# Altium schematic symbol library LR112x_e655v01a.SchLib: 35 symbols
Pins are listed as number, name and electrical type; pins without a type are passive.

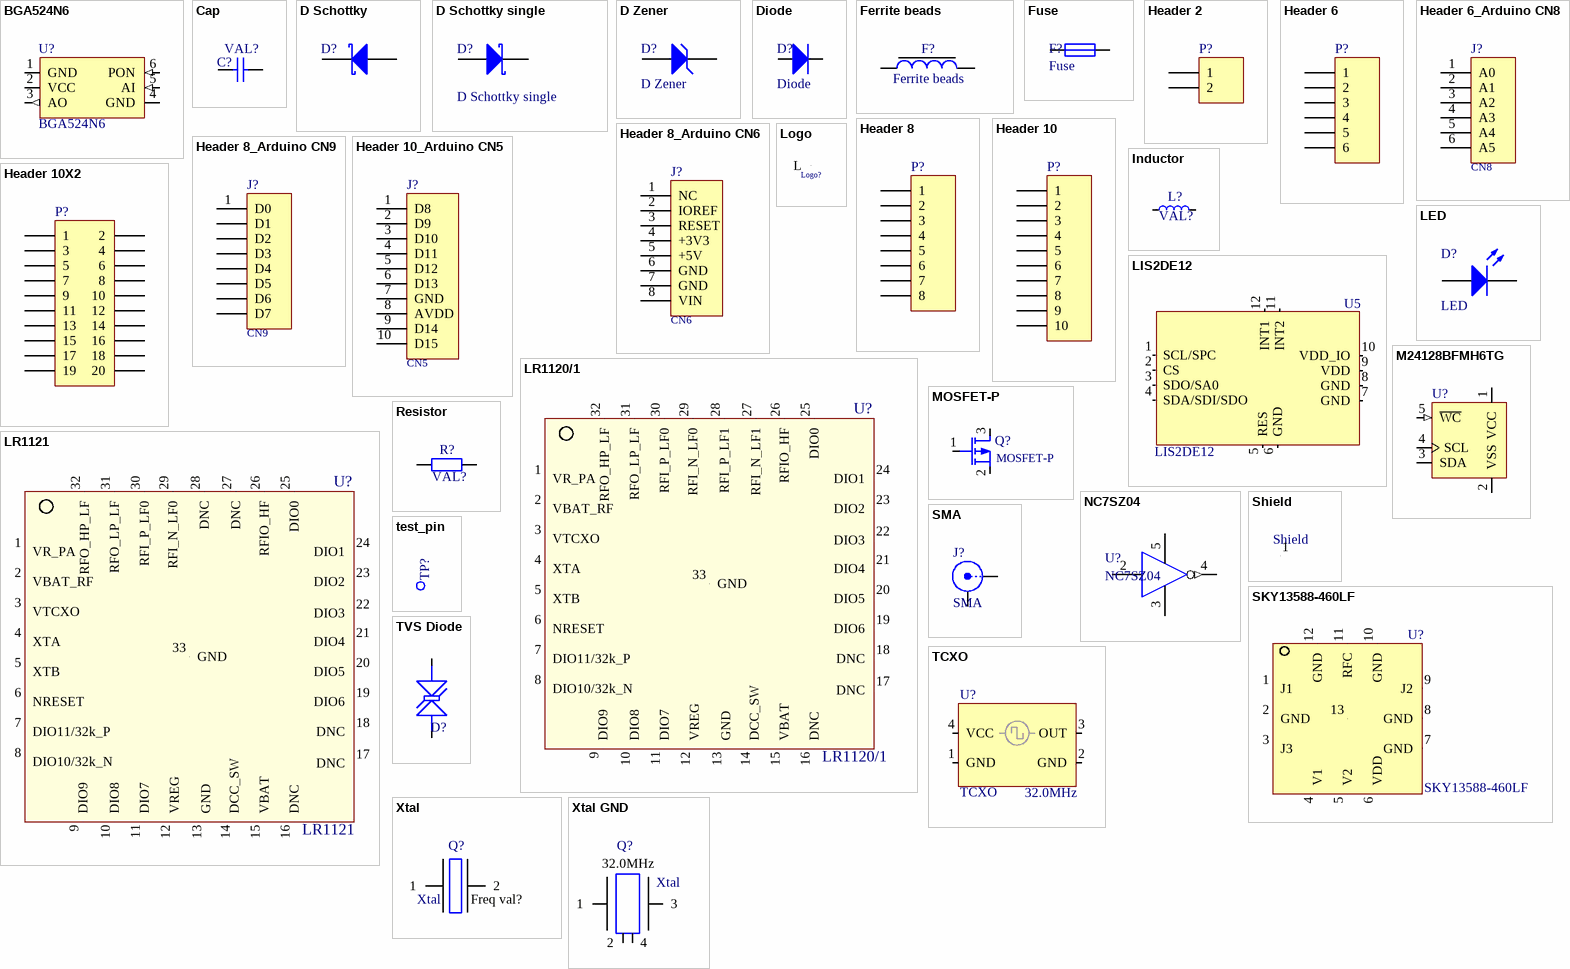
[diagram p0: symbols BGA524N6 to Xtal GND]

## BGA524N6
designator U?
Silicon Germanium Low Noise Amplifier
footprint TSNP-6-2 (TSNP-6-2 6-Leads, Body 1.1x0.7mm)
pins: 1 GND   (power), 2 VCC (power), 3 AO (out), 4 GND (power), 5 AI (in), 6 PON (in)

## Cap
designator C?  value VAL?  (hidden comment: Cap)
Capacitor SMD; Published: 8-Jun-2000; LatestRevisionDate: 05-oct-2007  -  Semtech; LatestRevisionNote: Re-released for DXP Platform.; Publisher: Altium Limited
simulation model CAP (Semiconductor Capacitor)
signal-integrity model Cap Semi
footprint c_201_smd (Chip SMD component 201; Body 0.6 x 0.3 mm (LxW typ); small footprint)
footprint c_402_smd (Chip SMD component 402; Body 1.0 x 0.5 mm (LxW typ);small footprint)
footprint c_603_smd (Chip SMD component 603; Body 1.6 x 0.8mm (LxW typ); small footprint)
footprint c_805_smd (Chip SMD component 805; Body 2.0 x 1.25 mm (LxW typ); small footprint)
pins: 1, 2

## D Schottky
designator D?
Schottky Diode; Published: 8-Jun-2000; LatestRevisionDate: 17-Jul-2002; LatestRevisionNote: Re-released for DXP Platform.; PackageReference: SMB; Publisher: Altium Limited; Code_JEDEC: DO-214-AA
footprint SOD523 (SOD523; Chip Diode; Body 1.2 x 0.8 mm (LxW typ))
pins: 1 K, 2 A

## D Schottky single
designator D?
Schottky Diode
footprint SOD123 (SOD123; Chip Diode; Body  2.7 x 1.6 mm (LxW typ))
pins: 1 A, 2 K

## D Zener
designator D?
Zener Diode; Published: 8-Jun-2000; LatestRevisionDate: 05-oct-2007  -  Semtech; LatestRevisionNote: Re-released for DXP Platform.; Publisher: Altium Limited
footprint CD1608-0603 (Chip Diode; Body 1.6 x 0.8 mm (LxW typ))
footprint CD2012-0805 (Chip Diode; Body 2.0 x 1.3 mm (LxW typ))
pins: 1 A, 2 K

## Diode
designator D?
Protection Diode; Published: 8-Jun-2000; LatestRevisionDate: 17-Jul-2002; LatestRevisionNote: Re-released for DXP Platform.; PackageDocument: Sep-1996; PackageReference: SMC; Publisher: Altium Limited; Code_JEDEC: 05-oct-2007  -  Semtech
footprint CD1005-0402 (Chip Diode; Body 1.0 x 0.5 mm (LxW typ))
footprint CD1608-0603 (Chip Diode; Body 1.6 x 0.8 mm (LxW typ))
footprint CD2012-0805 (Chip Diode; Body 2.0 x 1.3 mm (LxW typ))
footprint CD3216-1206 (Chip Diode; Body 3.2 x 1.6 mm (LxW typ))
footprint PowerDI 123 (Chip Diode; PowerDI 123)
footprint DO214-AA (Chip Diode; Body 4.3 x3.6mm (LxW typ))
footprint SOD123 (SOD123; Chip Diode; Body  2.7 x 1.6 mm (LxW typ))
pins: 1 A, 2 K

## Ferrite beads
designator F?
Value: VAL?
footprint rlc_402_smd_small (Chip SMD component 402; Body 1.0 x 0.5 mm (LxW typ);small footprint)
footprint rlc_603_smd_small (Chip SMD component 603; Body 1.6 x 0.8mm (LxW typ); small footprint)
footprint rlc_805_smd_small (Chip SMD component 805; Body 2.0 x 1.25 mm (LxW typ); small footprint)
footprint rlc_1206_smd_small (Chip SMD component 1206; Body 3.2 x 1.6 mm (LxW typ))
footprint rlc_201_smd_small (Chip SMD component 201; Body 0.6 x 0.3 mm (LxW typ); small footprint)
footprint Ferrite_201_smd (Chip SMD component 201; Body 0.6 x 0.3 mm (LxW typ); small footprint)
footprint Ferrite_402_smd (Chip SMD component 402; Body 1.0 x 0.5 mm (LxW typ);small footprint)
footprint Ferrite_603_smd (Chip SMD component 603; Body 1.6 x 0.8mm (LxW typ); small footprint)
footprint Ferrite_805_smd (Chip SMD component 805; Body 2.0 x 1.25 mm (LxW typ); small footprint)
pins: 1, 2

## Fuse
designator F?
Published: 8-Jun-2000; LatestRevisionDate: 05-oct-2007  -  Semtech; LatestRevisionNote: Re-released for DXP Platform.; Publisher: Altium Limited
simulation model FUSE (Spice Subcircuit)
footprint rlc_1206_smd (Chip SMD component 1206; Body 3.2 x 1.6 mm (LxW typ))
footprint rlc_805_smd (Chip SMD component 805; Body 2.0 x 1.25 mm (LxW typ))
footprint rlc_603_smd (Chip SMD component 603; Body 1.6 x 0.8mm (LxW typ))
footprint rlc_402_smd (Chip SMD component 402; Body 1.0 x 0.5 mm (LxW typ))
pins: 1, 2

## Header 2
designator P?
Header, 2-Pin; LatestRevisionDate: 17-Jul-2002; LatestRevisionNote: Re-released for DXP Platform.; Publisher: Altium Limited
footprint HDR1X2 (Connector; Header; 2 Position)
signal-integrity model Connector
footprint HDR1X2_SMD (Connector; Header; 2 Position; SMD)
pins: 1, 2

## Header 6
designator P?
Header, 6-Pin; LatestRevisionDate: 17-Jul-2002; LatestRevisionNote: Re-released for DXP Platform.; Publisher: Altium Limited
footprint HDR1X6 (Connector; Header; 6 Position)
signal-integrity model Connector
pins: 1, 2, 3, 4, 5, 6

## Header 6_Arduino CN8
designator J?, comment Header 6  (value not drawn)
Header, 6-Pin with Arduino pinout; CN8; LatestRevisionDate: 17-Jul-2002; LatestRevisionNote: Re-released for DXP Platform.; Publisher: Altium Limited
footprint HDR1X6 (Connector; Header; 6 Position)
signal-integrity model Connector
footprint HDR1X6 Arduino CN8 (Connector; Header; 6 Position; Arduino labels)
pins: 1 A0, 2 A1, 3 A2, 4 A3, 5 A4, 6 A5
text: CN8

## Header 8
designator P?
Header, 8-Pin; LatestRevisionDate: 17-Jul-2002; LatestRevisionNote: Re-released for DXP Platform.; Publisher: Altium Limited
footprint HDR1X8 (Connector; Header; 8 Position)
signal-integrity model Connector
footprint HDR1X8_NS (Connector; Header; 8 Position; No Silkscreen)
pins: 1, 2, 3, 4, 5, 6, 7, 8

## Header 8_Arduino CN6
designator J?, comment Header 8  (value not drawn)
Header, 8-Pin with Arduino pinout; DC Supply; LatestRevisionDate: 17-Jul-2002; LatestRevisionNote: Re-released for DXP Platform.; Publisher: Altium Limited
footprint HDR1X8 (Connector; Header; 8 Position)
signal-integrity model Connector
footprint HDR1X8 Arduino CN6 (Connector; Header; 8 Position; Arduino labels)
footprint HDR1X8_NS (Connector; Header; 8 Position; No Silkscreen)
pins: 1 NC, 2 IOREF, 3 RESET, 4 +3V3, 5 +5V, 6 GND, 7 GND, 8 VIN
text: CN6

## Header 8_Arduino CN9
designator J?, comment Header 8  (value not drawn)
Header, 8-Pin with Arduino pinout; D0 to D7; CN9; LatestRevisionDate: 17-Jul-2002; LatestRevisionNote: Re-released for DXP Platform.; Publisher: Altium Limited
footprint HDR1X8 (Connector; Header; 8 Position)
signal-integrity model Connector
footprint HDR1X8 Arduino CN9 (Connector; Header; 8 Position; Arduino labels)
footprint HDR1X8_NS (Connector; Header; 8 Position; No Silkscreen)
pins: 1 D0, 2 D1, 3 D2, 4 D3, 5 D4, 6 D5, 7 D6, 8 D7
text: CN9

## Header 10
designator P?
Header, 10-Pin; LatestRevisionDate: 17-Jul-2002; LatestRevisionNote: Re-released for DXP Platform.; Publisher: Altium Limited
footprint HDR1X10 (Connector; Header; 10 Position)
signal-integrity model Connector
footprint HDR1X10_TFT_Display (Connector; Header; 10 Position; Adafruit TFT Display)
pins: 1, 2, 3, 4, 5, 6, 7, 8, 9, 10

## Header 10_Arduino CN5
designator J?, comment Header 10  (value not drawn)
Header, 10-Pin with Arduino pinout; D8 to D15; CN5; LatestRevisionDate: 17-Jul-2002; LatestRevisionNote: Re-released for DXP Platform.; Publisher: Altium Limited
footprint HDR1X10 (Connector; Header; 10 Position)
signal-integrity model Connector
footprint HDR1X10_TFT_Display (Connector; Header; 10 Position; Adafruit TFT Display)
footprint HDR1X10 Arduino CN5 (Connector; Header; 10 Position; Arduino labels)
footprint HDR1X10_NS (Connector; Header; 10 Position; No Silkscreen)
pins: 1 D8, 2 D9, 3 D10, 4 D11, 5 D12, 6 D13, 7 GND, 8 AVDD, 9 D14, 10 D15
text: CN5

## Header 10X2
designator P?
Header, 10-Pin, Dual row; LatestRevisionDate: 17-Jul-2002; LatestRevisionNote: Re-released for DXP Platform.; Publisher: Altium Limited
footprint HDR2X10 (Connector; Header; 10x2 Position)
signal-integrity model Connector
pins: 1, 2, 3, 4, 5, 6, 7, 8, 9, 10, 11, 12, 13, 14, 15, 16, 17, 18, 19, 20

## Inductor
designator L?, comment value VAL?  (hidden comment: Inductor symbol)
Inductor; Code_IEC: 1005; Published: 15-Jun-2021; LatestRevisionDate: 15-Jun-2021 -  Semtech; LatestRevisionNote: Re-released for DXP Platform.; Publisher: Altium Limited; Code_JEITA: 0402
footprint rlc_201_smd_small (Chip SMD component 201; Body 0.6 x 0.3 mm (LxW typ); small footprint)
footprint rlc_402_smd_small (Chip SMD component 402; Body 1.0 x 0.5 mm (LxW typ);small footprint)
footprint rlc_603_smd_small (Chip SMD component 603; Body 1.6 x 0.8mm (LxW typ); small footprint)
footprint rlc_805_smd_small (Chip SMD component 805; Body 2.0 x 1.25 mm (LxW typ); small footprint)
footprint rlc_1206_smd_small (Chip SMD component 1206; Body 3.2 x 1.6 mm (LxW typ))
footprint lqg_402_smd (Chip SMD component 402; Body 1.0 x 0.5 mm (LxW typ);small footprint)
footprint LQP_201_smd (Chip SMD component 201; Body 0.6 x 0.3 mm (LxW typ); small footprint)
footprint LQW_201_smd (Chip SMD component 201; Body 0.6 x 0.3 mm (LxW typ); small footprint)
footprint lqw_402_smd (Chip SMD component 402; Body 1.0 x 0.5 mm (LxW typ);small footprint)
pins: 1, 2

## LED
designator D?
LatestRevisionDate: 05-oct-2007  -  Semtech
footprint CD1005-0402 (Chip Diode; Body 1.0 x 0.5 mm (LxW typ))
footprint CD1608-0603 (Chip Diode; Body 1.6 x 0.8 mm (LxW typ))
footprint CD2012-0805 (Chip Diode; Body 2.0 x 1.3 mm (LxW typ))
footprint Reverse LED 3216 - 1206-hole round (Reverse Package Chip LED; Body 3.2 x 1.6 mm (LxW typ))
footprint Reverse LED 3216 - 1206 - hole slot (Reverse Package Chip LED; Body 3.2 x 1.6 mm (LxW typ))
footprint LGM676 LED (Chip Diode; Body 2.1 x 1.4 mm (LxW typ))
pins: 1 A, 2 K

## LIS2DE12
designator U5
ultra-low-power high-performance 3-axis "femto" accelerometer; ComponentLink1Description: DataSheet; ComponentLink1URL: https://www.st.com/resource/en/datasheet/lis2de12.pdf
footprint LGA-12 2x2mm (LGA-12 2x2mm; 0.5mm pitch)
pins: 1 SCL/SPC (in), 2 CS (in), 3 SDO/SA0 (io), 4 SDA/SDI/SDO (io), 5 RES, 6 GND (power), 7 GND (power), 8 GND (power), 9 VDD (power), 10 VDD_IO (power), 11 INT2 (out), 12 INT1 (out)

## Logo
designator Logo?, comment Logo symbol  (value not drawn)
Schematic symbol for Logo
footprint logo_semtech_horiz_size1 (Logo semtech horizontal - size1 - S)
footprint logo_semtech_horiz_size2 (Logo semtech horizontal - size2 - M)
footprint logo_semtech_horiz_size3 (Logo semtech horizontal - size3 - L)
footprint logo_semtech_horiz_size4 (Logo semtech horizontal - size4 - XL)
footprint Logo ESD
footprint Logo LoRa Size1 (Logo LoRa Size1 - Top Overlay - 6x4mm - Registered)
footprint Logo LoRa Size2 (Logo LoRa Size2 - Top Overlay - 9x5.5mm - Registered)
footprint Logo LoRa Size3 (Logo LoRa Size3 - Top Overlay - 14.5x8mm - Registered)
footprint Logo LoRa Size4 (Logo LoRa Size4 - Top Overlay - 18x9.5mm - Registered)
footprint Logo Recycling1
footprint Logo Recycling2
pins: 0 L "Logo"

## LR1120/1
designator U?
LR1120/1 - Low Power Integrated UHF Transceiver with LoRa Modem; LatestRevisionDate: 27-Jul-2009 -  Semtech
footprint qfn32l_5x5mm (32 Leads, Body 5.0x5.0mm, Pitch 0.50mm, QFN32L)
pins: 1 VR_PA, 2 VBAT_RF (power), 3 VTCXO, 4 XTA, 5 XTB, 6 NRESET, 7 DIO11/32k_P , 8 DIO10/32k_N, 9 DIO9, 10 DIO8, 11 DIO7, 12 VREG (power), 13 GND (power), 14 DCC_SW (power), 15 VBAT (power), 16 DNC, 17 DNC, 18 DNC, 19 DIO6, 20 DIO5, 21 DIO4, 22 DIO3, 23 DIO2, 24 DIO1, 25 DIO0, 26 RFIO_HF, 27 RFI_N_LF1, 28 RFI_P_LF1, 29 RFI_N_LF0, 30 RFI_P_LF0, 31 RFO_LP_LF, 32 RFO_HP_LF, 33 GND (power)

## LR1121
designator U?
LR1121 - Low Power Integrated UHF Transceiver with LoRa Modem; LatestRevisionDate: 27-Jul-2009 -  Semtech
footprint qfn32l_5x5mm (32 Leads, Body 5.0x5.0mm, Pitch 0.50mm, QFN32L)
pins: 1 VR_PA, 2 VBAT_RF (power), 3 VTCXO, 4 XTA, 5 XTB, 6 NRESET, 7 DIO11/32k_P , 8 DIO10/32k_N, 9 DIO9, 10 DIO8, 11 DIO7, 12 VREG (power), 13 GND (power), 14 DCC_SW (power), 15 VBAT (power), 16 DNC, 17 DNC, 18 DNC, 19 DIO6, 20 DIO5, 21 DIO4, 22 DIO3, 23 DIO2, 24 DIO1, 25 DIO0, 26 RFIO_HF, 27 DNC, 28 DNC, 29 RFI_N_LF0, 30 RFI_P_LF0, 31 RFO_LP_LF, 32 RFO_HP_LF, 33 GND (power)

## M24128BFMH6TG
designator U?
ST - 128-Kbit serial I²C bus EEPROM - DFN5 package; Published: 2-Dec-2009; DatasheetVersion: revF, Oct-2008; PackageVersion: revBB, Aug-2009; Publisher: Altium Limited; Supplier 1: Digi-Key; Supplier Part Number 1: 24AA128-I/MF; ComponentLink2Description: Packaging Specification; ComponentLink3Description: Microchip.com Home; ComponentLink3URL: http://www.microchip.com/
footprint DFN5_1.7x1.4mm (DFN5; 5 Leads; Body 1.7 x 1.4 mm, inc. leads (LxW max))
pins: 1 VCC (power), 2 VSS (power), 3 SDA, 4 SCL, 5 ~{WC} (in)

## MOSFET-P
designator Q?
P-Channel MOSFET; PackageDocument: 1995/1996; Published: 8-Jun-2000; LatestRevisionDate: 05-oct-2007  -  Semtech; LatestRevisionNote: Re-released for DXP Platform.; Publisher: Altium Limited
footprint SOT23A (SOT-23; 3 Leads; Body 3.0 x 2.5 mm, inc. leads (LxW max))
footprint SC70 (SC70 or SOT-323; 3-Leads, Body 2.1x1.25mm)
pins: 1 G, 2 S, 3 D

## NC7SZ04
designator U?
NC7SZ04 - TinyLogic HS Single Inverter - Fairchild Semi
footprint SOT23-5 (SOT23, 5-Leads, Body 2.9x1.6mm, Pitch 0.95mm, Lead Span 2.8mm, IPC Medium Density)
footprint SC70-5 (SC70 5-Leads, Body 2.0x1.25mm, Pitch 0.65mm)
pins: 2 A, 3 GND (power), 4 Y (out), 5 VCC (power)

## Resistor
designator R?  value VAL?  (hidden comment: Resistor)
Resistor SMD - IEC symbol version; LatestRevisionDate: 27-Jul-20  -  Semtech
footprint rlc_805_smd_small (Chip SMD component 805; Body 2.0 x 1.25 mm (LxW typ); small footprint)
footprint rlc_1206_smd_small (Chip SMD component 1206; Body 3.2 x 1.6 mm (LxW typ))
footprint r_201_smd (Chip SMD component 201; Body 0.6 x 0.3 mm (LxW typ); small footprint)
footprint r_402_smd (Chip SMD component 402; Body 1.0 x 0.5 mm (LxW typ);small footprint)
footprint r_603_smd (Chip SMD component 603; Body 1.6 x 0.8mm (LxW typ); small footprint)
pins: 1, 2

## Shield
designator Shield, comment RF Shield  (value not drawn)
RF Shield - EMI Gasket - Standard Surface Mount Shields
footprint BMI-S-205-F - Shield (BMIS-205-F EMI Gasket - modif SolderMask - Standard Surface Mount Shields -  Laird Technologies)
footprint BMI-S-230-F - Shield (BMI-S-230-F EMI Gasket - SolderMask - Standard Surface Mount Shields -  Laird Technologies)
footprint BMI-S-210-F - Shield (BMI-S-210-F EMI Gasket - SolderMask - Standard Surface Mount Shields -  Laird Technologies)
footprint SMS-461 - Shield (SMS-461 - RF Shield EMI Gasket - Standard Surface Mount Shields -  Leader Tech)
footprint BMI S-209-F - Shield (BMIS-209-F EMI Gasket - modif SolderMask - Standard Surface Mount Shields -  Laird Technologies)
pins: 1 "Shield"

## SKY13588-460LF
designator U?
SKY13588-460LF - 0.1 to 6.0 GHz SP3T Switch; LatestRevisionDate: 04-jan-2008  -  Semtech
footprint qfn12_2x2mm (12 Leads, Body 2.0x2.0mm, Pitch 0.50mm, QFN12)
pins: 1 J1, 2 GND (power), 3 J3, 4 V1, 5 V2, 6 VDD (power), 7 GND (power), 8 GND (power), 9 J2, 10 GND (power), 11 RFC, 12 GND (power), 13 GND

## SMA
designator J?
SMA Straight Connector; LatestRevisionDate: 05-oct-2007  -  Semtech; LatestRevisionNote: Re-released for DXP Platform.; Publisher: Altium Limited
footprint SMA END LAUNCH JACK RECEPTACLE (SMA Connector - End Launch Jack Receptacle)
footprint SMA_end_launch_1.0mm_9.52mm (SMA end launch for 1.0mm PCB thickness; 9.52mm)
footprint SMA END LAUNCH JACK RECEPTACLE SHORT (SMA Connector - End Launch Jack Receptacle - Short)
pins: 1 Signal "RF signal", 2 GND "Ground signal"

## TCXO
designator U?  value 32.0MHz
footprint TCXO 2.0x1.6mm (SMD 2.0x1.6mm for TCXO or VCTCXO)
pins: 1 GND, 2 GND, 3 OUT, 4 VCC

## test_pin
designator TP?, comment Test Pin  (value not drawn)
LatestRevisionDate: 05-oct-2007  -  Semtech
footprint pin_1mm (Generic Pin 1.1mm; 1 Lead)
footprint pin_1.1mm (Generic Pin 1.1mm; 1 Lead)
footprint pin_0.9mm (Generic Pin 0.9mm; 1 Lead)
footprint PIN_SMD (Generic Pin SMD; 1 Lead)
footprint pin_0.8mm (Generic Pin 0.8mm; 1 Lead)
footprint PIN_SMD_SQUARE (Generic Pin SMD; 1 Lead)
pins: 1 pin "Test Pin"

## TVS Diode
designator D?  (value not drawn)
Ultra Low Capacitance 1-line ESD Protection; LatestRevisionDate: 23-Aug-2016; Type: TVS Diode
footprint SLP1006P2T (Chip TVS Diode; Body 1.0 x 0.6 mm (LxW typ))
footprint SLP0603P2X3F (Chip Diode; Body  0.6 x 0.3 mm (LxW typ))
pins: 1 A, 2 K

## Xtal
designator Q?  value Freq val?
Crystal oscillator; LatestRevisionDate: 05-oct-2007  -  Semtech
footprint XTAL_3215_SMD (XTAL SMD; Body 3.2x1.5 mm (LxW max))
footprint XTAL_2012_SMD (XTAL SMD; Body 2.0x1.2 mm (LxW max))
pins: 1, 2

## Xtal GND
designator Q?, comment Xtal  value 32.0MHz
Crystal with GND pins; LatestRevisionDate: 05-oct-2007  -  Semtech
footprint nd2520da (Crystal SMD 2.5x2.0mm)
footprint nd2016da (Crystal SMD 2.0x1.6mm)
footprint nd3225da (Crystal SMD 3.2x2.5mm)
footprint nd5032da (Crystal SMD 5.0x3.2mm)
footprint nd6035da (Crystal SMD 6.0x3.5mm)
footprint nd7050da - enlarge (Crystal SMD 7.0x5.0mm - Enlarge Pads to be compatible with 3.2x2.5mm footprint)
footprint nd3225da - nd2520da (Crystal SMD 3.2x2.5mm compatible with 2.5x2.0mm)
pins: 1, 2, 3, 4